# Altium footprint library LimeMicroAltiumLib.PcbLib: 876 footprints (part 18 of 57)
Each footprint in its own frame and in the unit in brackets; x right, y up, seen from the top. Pads: shape width x height; smd on the part's side, far side on the other; paste and mask are expansions set on the pad; w line width, h text height; cw(c..) or ccw(c..) is an arc to the next point about the centre after c.
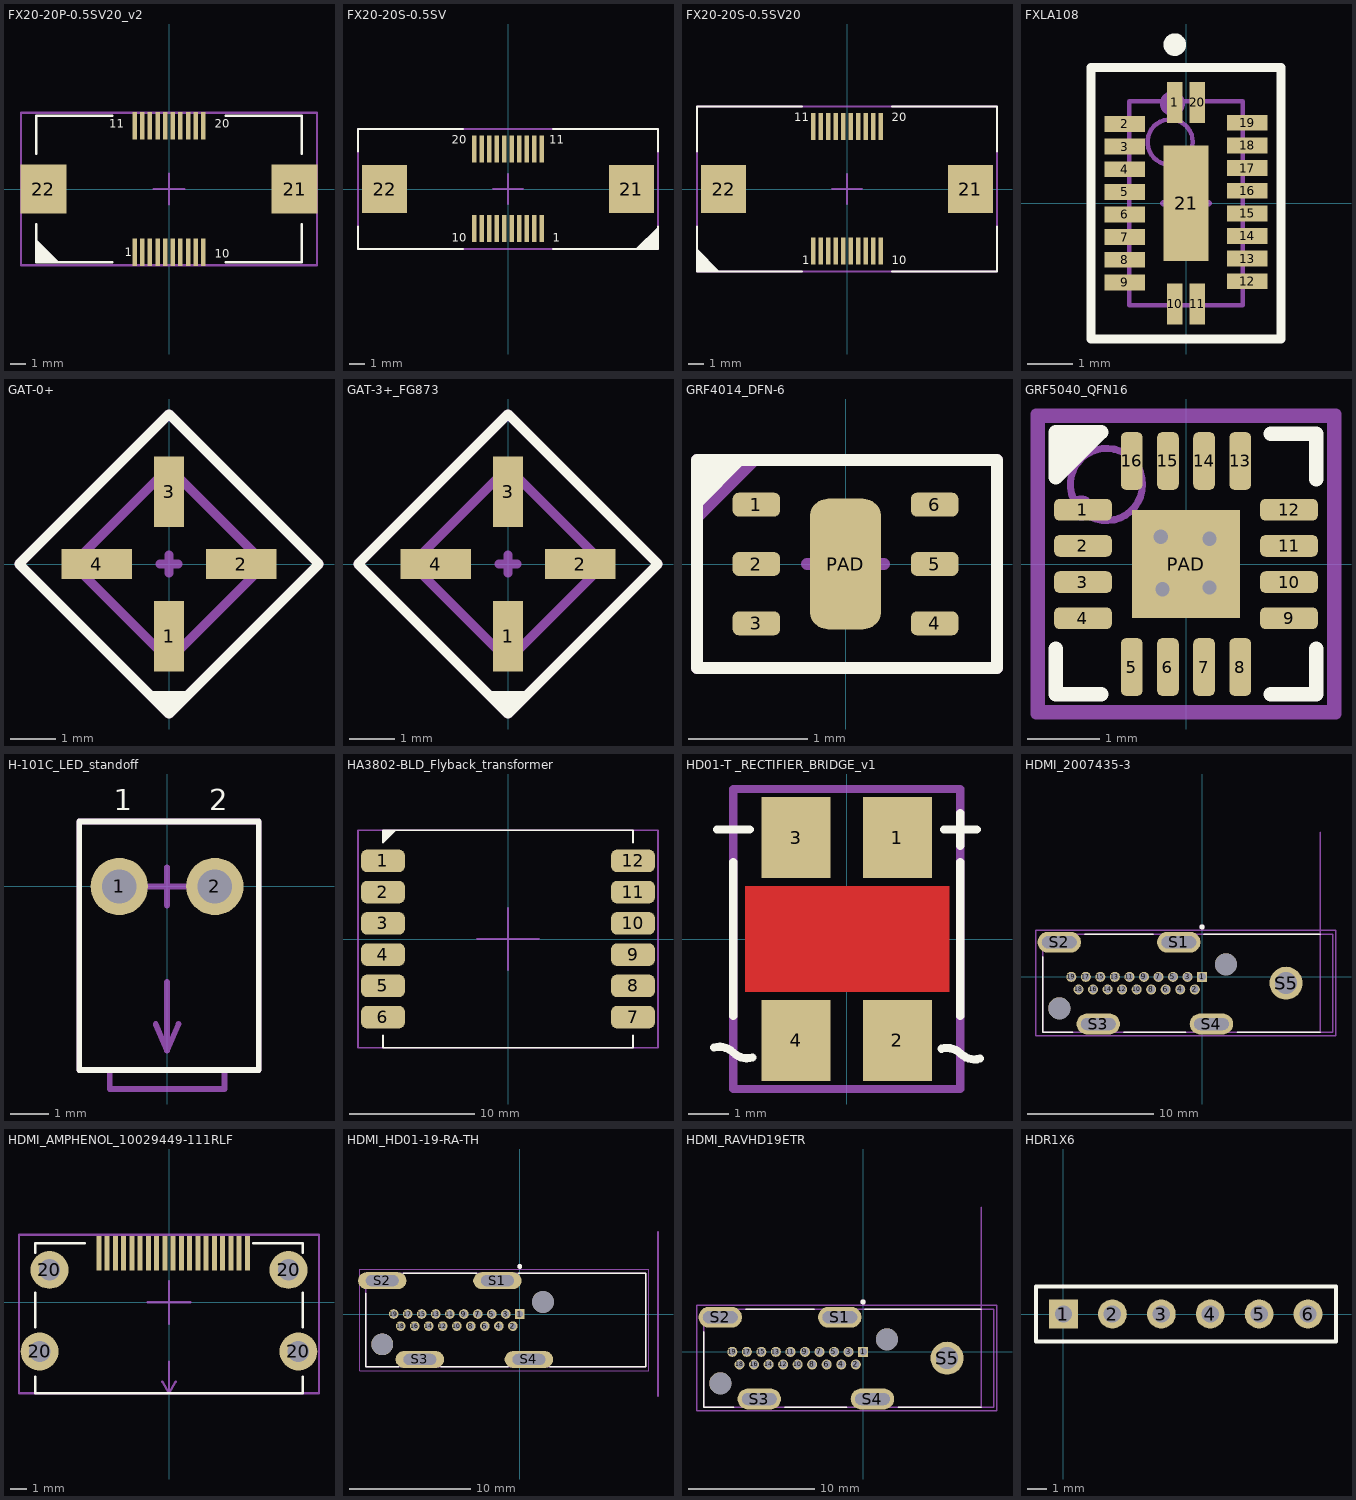
[diagram p17: the footprints below, top view; thin cyan lines are the x and y axes]

## FX20-20P-0.5SV20_v2 [mm]
pads (22):
  rect 0.3x1.8 smd mask+0.05: 1(-2.25,-4.15) 2(-1.75,-4.15) 3(-1.25,-4.15) 4(-0.75,-4.15) 5(-0.25,-4.15) 6(0.25,-4.15) 7(0.75,-4.15) 8(1.25,-4.15) 9(1.75,-4.15) 10(2.25,-4.15) 11(-2.25,4.15) 12(-1.75,4.15) 13(-1.25,4.15) 14(-0.75,4.15) 15(-0.25,4.15) 16(0.25,4.15) 17(0.75,4.15) 18(1.25,4.15) 19(1.75,4.15) 20(2.25,4.15)
  rect 3x3.2 smd mask+0.05: 21(8.23,0) 22(-8.23,0)
Top Overlay:
  region: -8.7,-3.3 -7.2,-4.8 -8.7,-4.8
  lines w0.15: -8.7,-2.3 -8.7,-4.8 -3.7,-4.8 ; -8.7,2.3 -8.7,4.8 -3.7,4.8 ; 3.7,-4.8 8.7,-4.8 8.7,-2.3 ; 3.7,4.8 8.7,4.8 8.7,2.3
  text "20" at 3,4 h0.55
  text "11" at -3.9,4 h0.55
  text "1" at -2.9,-4.4 h0.55
  text "10" at 3,-4.5 h0.55
Mechanical 15:
  lines w0.15: -1,0 1,0 ; 0,-1 0,1 ; -9.7,-5 -9.7,5 9.7,5 9.7,-5 -9.7,-5
  text ".Designator" at 0,0 h0.55
  text "1" at -2.5,-4.5 h0.55
  text "10" at 2.5,-4.5 h0.55
  text "11" at -3,4 h0.55
  text "20" at 2.5,4 h0.55
3D body "FX20-20P-0.5SV20.stp": height 18.2, standoff 0, extent -8.7,-4.75 8.7,4.75

## FX20-20S-0.5SV [mm]
pads (22):
  rect 0.3x1.8 smd mask+0.05: 1(2.25,-2.65) 2(1.75,-2.65) 3(1.25,-2.65) 4(0.75,-2.65) 5(0.25,-2.65) 6(-0.25,-2.65) 7(-0.75,-2.65) 8(-1.25,-2.65) 9(-1.75,-2.65) 10(-2.25,-2.65) 11(2.25,2.65) 12(1.75,2.65) 13(1.25,2.65) 14(0.75,2.65) 15(0.25,2.65) 16(-0.25,2.65) 17(-0.75,2.65) 18(-1.25,2.65) 19(-1.75,2.65) 20(-2.25,2.65)
  rect 3x3.2 smd mask+0.05: 21(8.23,0) 22(-8.23,0)
Top Overlay:
  region: 8.5,-4 10,-2.5 10,-4
  lines w0.15: -10,-2.5 -10,-4 -3,-4 ; -10,2.5 -10,4 -3,4 ; 3,-4 10,-4 10,-2.5 ; 3,4 10,4 10,2.5
  text "20" at -3.75,3 h0.55
  text "11" at 2.75,3 h0.55
  text "1" at 3,-3.5 h0.55
  text "10" at -3.75,-3.5 h0.55
Mechanical 15:
  lines w0.15: -1,0 1,0 ; 0,-1 0,1 ; -10,-4 -10,4 10,4 10,-4 -10,-4
  text ".Designator" at 0,0 h0.55
  text "1" at 2.5,-3 h0.55
  text "10" at -3,-3 h0.55
  text "11" at 2.5,2.5 h0.55
  text "20" at -3.5,2.5 h0.55
3D body "FX20-20S-0.5SV.stp": height 8.3, standoff 0, extent -8.7,-3.4 8.7,3.4

## FX20-20S-0.5SV20 [mm]
pads (22):
  rect 0.3x1.8 smd mask+0.05: 1(-2.25,-4.15) 2(-1.75,-4.15) 3(-1.25,-4.15) 4(-0.75,-4.15) 5(-0.25,-4.15) 6(0.25,-4.15) 7(0.75,-4.15) 8(1.25,-4.15) 9(1.75,-4.15) 10(2.25,-4.15) 11(-2.25,4.15) 12(-1.75,4.15) 13(-1.25,4.15) 14(-0.75,4.15) 15(-0.25,4.15) 16(0.25,4.15) 17(0.75,4.15) 18(1.25,4.15) 19(1.75,4.15) 20(2.25,4.15)
  rect 3x3.2 smd mask+0.05: 21(8.23,0) 22(-8.23,0)
Top Overlay:
  region: -10,-4 -8.5,-5.5 -10,-5.5
  lines w0.15: -10,-2.5 -10,-5.5 -3,-5.5 ; -10,2.5 -10,5.5 -3,5.5 ; 3,-5.5 10,-5.5 10,-2.5 ; 3,5.5 10,5.5 10,2.5
  text "10" at 3,-5 h0.55
  text "1" at -3,-5 h0.55
  text "11" at -3.5,4.5 h0.55
  text "20" at 3,4.5 h0.55
Mechanical 15:
  lines w0.15: -1,0 1,0 ; 0,-1 0,1 ; -10,-5.5 10,-5.5 10,5.5 -10,5.5 -10,-5.5
  text "20" at 2.5,4 h0.55
  text "11" at -3,4 h0.55
  text "10" at 2.5,-4.5 h0.55
  text "1" at -2.5,-4.5 h0.55
  text ".Designator" at 0,0 h0.55
3D body "FX20-20P-0.5SV20.stp": height 18.2, standoff 0, extent -8.7,-4.75 8.7,4.75

## FXLA108 [mm] "PQFN, 20-Leads, Body 2,50x4,50mm, Pitch 0,50mm, Thermal Pad 1,00x2,55mm, IPC Medium Density"
height 0.8
pads (21):
  rect 0.35x0.9 smd mask+0.05: 1(-0.25,2.225) 10(-0.25,-2.225) 11(0.25,-2.225) 20(0.25,2.225)
  rect 0.9x0.35 smd mask+0.05: 2(-1.35,1.75) 3(-1.35,1.25) 4(-1.35,0.75) 5(-1.35,0.25) 6(-1.35,-0.25) 7(-1.35,-0.75) 8(-1.35,-1.25) 9(-1.35,-1.75) 12(1.35,-1.725) 13(1.35,-1.225) 14(1.35,-0.725) 15(1.35,-0.225) 16(1.35,0.275) 17(1.35,0.775) 18(1.35,1.275) 19(1.35,1.775)
  rect 1x2.55 smd mask+0.05: 21(0,0)
Top Overlay:
  circle w0.25: c-0.25,3.5 r0.125
  lines w0.2: -2.1,-3 -2.1,3 2.1,3 2.1,-3 -2.1,-3
Top Solder:
  region: -0.475,-1.725 0.475,-1.725 0.475,-2.725 -0.475,-2.725
  region: -0.475,2.725 0.475,2.725 0.475,1.725 -0.475,1.725
  region: 0.85,2 0.85,-1.95 1.85,-1.95 1.85,2
  region: -1.85,1.975 -1.85,-1.975 -0.85,-1.975 -0.85,1.975
Mechanical 13:
  circle w0.1: c-0.35,1.35 r0.5
  lines w0.1: -1.25,-2.25 1.25,-2.25 1.25,2.25 -1.25,2.25 -1.25,-2.25
Mechanical 15:
  circle w0.35: c-0.3,2.2 r0.1
  lines w0.15: -0.5,0 0.5,0 ; 0,-0.5 0,0.5 ; -2.1,-3 2.1,-3 2.1,3 -2.1,3 -2.1,-3
  text ".Designator" at 0,0 h0.55
3D body: height 0.8, standoff 0, extent -1.25,-2.25 1.25,2.25

## GAT-0+ [mm]
pads (4):
  rect 0.65x1.55 smd: 1(0,-1.59) 3(0,1.59)
  rect 1.55x0.65 smd: 2(1.59,0) 4(-1.59,0)
Top Overlay:
  region: -0.5,-2.8 0.5,-2.8 0,-3.3
  lines w0.2: -3.3,0 0,-3.3 3.3,0 0,3.3 -3.3,0
Mechanical 13:
  lines w0.2: -2.12,0 0,-2.12 2.12,0 0,2.12 -2.12,0 ; -2.12,0 -2.12,0
Mechanical 15:
  circle w0.254: c0,-1.6 r0.056
  lines w0.2: -0.2,0 0,0 ; 0,-0.2 0,0 ; 0,0.2 0,0 ; 0.2,0 0,0 ; -3.3,0 0,-3.3 3.3,0 0,3.3 -3.3,0
  text ".Designator" at 0,0 h0.55
3D body "User Library-MINI-CIRCUITS_FG873.STEP": height 0.89, standoff -0.01, extent -2.121,-2.121 2.121,2.121

## GAT-3+_FG873 [mm]
pads (4):
  rect 0.65x1.55 smd: 1(0,-1.59) 3(0,1.59)
  rect 1.55x0.65 smd: 2(1.59,0) 4(-1.59,0)
Top Overlay:
  region: -0.5,-2.8 0.5,-2.8 0,-3.3
  lines w0.2: -3.3,0 0,3.3 3.3,0 0,-3.3 -3.3,0
Mechanical 13:
  lines w0.2: -2.12,0 0,2.12 2.12,0 0,-2.12 -2.12,0 ; -2.12,0 -2.12,0
Mechanical 15:
  circle w0.254: c0,-1.6 r0.056
  lines w0.2: -0.2,0 0,0 ; 0,-0.2 0,0 ; 0,0.2 0,0 ; 0.2,0 0,0 ; -3.3,0 0,3.3 3.3,0 0,-3.3 -3.3,0
  text ".Designator" at 0,0 h0.55
3D body "User Library-MINI-CIRCUITS_FG873.STEP": height 0.89, standoff -0.01, extent -2.122,-2.121 2.121,2.121

## GRF4014_DFN-6 [mm]
pads (7):
  rrect50% 0.4x0.2 smd mask+0.05: 1(-0.75,0.5) 2(-0.75,0) 3(-0.75,-0.5) 4(0.75,-0.5) 5(0.75,0) 6(0.75,0.5)
  rrect50% 0.6x1.1 smd mask+0.05: PAD(0,0)
Top Overlay:
  region: -1.25,0.45 -0.825,0.875 -1.25,0.875
  lines w0.1: 1.275,0.85 1.275,-0.875 -1.25,-0.875 -1.25,0.875 1.275,0.875
Mechanical 15:
  region: -1.25,0.325 -0.7,0.875 -1.25,0.875
  lines w0.1: -0.325,0 0,0 ; 0,-0.325 0,0 ; 0,0.325 0,0 ; 0.325,0 0,0 ; -1.25,-0.875 -1.25,0.875 1.275,0.875 1.275,-0.875 -1.25,-0.875
  text ".Designator" at 0,0.012 h0.55
3D body: height 0.45, standoff 0, extent -0.75,-0.75 0.75,0.75
3D body: height 0.46, standoff 0, extent -0.65,0.45 -0.451,0.65

## GRF5040_QFN16 [mm]
pads (17):
  rrect50% 0.8x0.3 smd mask+0.05: 1(-1.425,0.75) 2(-1.425,0.25) 3(-1.425,-0.25) 4(-1.425,-0.75) 9(1.425,-0.75) 10(1.425,-0.25) 11(1.425,0.25) 12(1.425,0.75)
  rrect50% 0.3x0.8 smd mask+0.05: 5(-0.75,-1.425) 6(-0.25,-1.425) 7(0.25,-1.425) 8(0.75,-1.425) 13(0.75,1.425) 14(0.25,1.425) 15(-0.25,1.425) 16(-0.75,1.425)
  rect 1.5x1.5 smd mask+0.05: PAD(0,0)
via -0.35,0.375 diameter 0.4 hole 0.2
via 0.325,0.35 diameter 0.4 hole 0.2
via 0.325,-0.325 diameter 0.4 hole 0.2
via -0.325,-0.35 diameter 0.4 hole 0.2
Top Overlay:
  region: -1.8,1.825 -1.8,1.2 -1.175,1.825
  lines w0.2: -1.8,-1.175 -1.8,-1.8 -1.175,-1.8 ; 1.175,-1.8 1.8,-1.8 1.8,-1.175 ; 1.175,1.8 1.8,1.8 1.8,1.175 ; -1.8,1.2 -1.175,1.825 -1.8,1.825 -1.8,1.2
Mechanical 13:
  circle w0.1: c-1.1,1.1 r0.5
  lines w0.1: -2,-2 2,-2 2,2 -2,2 -2,-2
Mechanical 15:
  circle w0.35: c-1.45,0.775 r0
  lines w0.15: -0.5,0 0.5,0 ; 0,-0.5 0,0.5 ; -2.075,-2.075 2.075,-2.075 2.075,2.075 -2.075,2.075 -2.075,-2.075
  text ".Designator" at 0,0 h0.55
3D body "User Library-qfn16-3x3.step": height 0.92, standoff 0, extent -1.5,-1.5 1.5,1.5

## H-101C_LED_standoff [mm]
pads (2):
  round 1.5 hole 0.9 mask+0.05: 1(-1.25,0) 2(1.25,0)
Top Overlay:
  lines w0.15: -2.3,-4.8 2.4,-4.8 2.4,1.7 -2.3,1.7 -2.3,-4.8
  text "1" at -1.4,2 h0.55
  text "2" at 1.1,2 h0.55
Mechanical 15:
  lines w0.15: -1.5,-4.8 -1.5,-5.3 1.5,-5.3 1.5,-4.8 ; -0.5,0 0,0 ; -0.3,-3.6 0,-4.3 ; 0,-2.5 0,-4.3 ; 0,-0.5 0,0 ; 0,0.5 0,0 ; 0.3,-3.6 0,-4.3 ; 0.5,0 0,0 ; -2.3,-4.8 2.4,-4.8 2.4,1.7 -2.3,1.7 -2.3,-4.8
  text ".Designator" at 0,0 h0.55
  text "1" at -1.3,-1.5 h0.39
  text "2" at 1.2,-1.5 h0.39
3D body "H-101C.stp": height 7.16, standoff 0.04, extent -2.118,-4.775 2.2,1.575
3D body: height 6.59, standoff 3.6, extent -1.494,-5.3 1.5,-3.3

## HA3802-BLD_Flyback_transformer [mm]
pads (12):
  rrect50% 3.5x1.8 smd: 1(-10,6.25) 2(-10,3.75) 3(-10,1.25) 4(-10,-1.25) 5(-10,-3.75) 6(-10,-6.25) 7(10,-6.25) 8(10,-3.75) 9(10,-1.25) 10(10,1.25) 11(10,3.75) 12(10,6.25)
Top Overlay:
  region: -10,7.7 -9,8.7 -10,8.7
  lines w0.15: -10,-7.7 -10,-8.7 10,-8.7 10,-7.7 ; -9,8.7 -10,7.7 -10,8.7 10,8.7 10,7.7
Mechanical 15:
  lines w0.15: -2.5,0 2.5,0 ; 0,-2.5 0,2.5 ; -12,-8.7 -12,8.7 12,8.7 12,-8.7 -12,-8.7
  text ".Designator" at 0,0 h0.55
  text "1" at -10.4,5.7 h0.55
  text "12" at 9.4,5.9 h0.55
  text "6" at -10.5,-6.7 h0.55
  text "7" at 9.7,-6.7 h0.55
3D body "Coilcraft-HA3801-BL.step": height 8.69, standoff -0.2, extent -11,-8.6 11,8.6

## HD01-T _RECTIFIER_BRIDGE_v1 [mm]
pads (4):
  rect 1.7x2 smd mask+0.05: 1(1.25,2.5) 2(1.25,-2.5) 3(-1.25,2.5) 4(-1.25,-2.5)
Top Layer:
  pour cut-out: -2.5,-1.3 -2.5,1.3 2.525,1.3 2.525,-1.3
Top Overlay:
  lines w0.2: -3.277,-2.678 cw(c-3.141,-3.141) -2.8,-2.8 ccw(c-2.459,-2.459) -2.323,-2.922 ; -3.2,2.7 -2.392,2.7 ; -2.8,-1.9 -2.8,0 -2.8,1.9 ; 2.335,-2.707 cw(c2.471,-3.171) 2.812,-2.829 ccw(c3.154,-2.488) 3.289,-2.951 ; 2.4,2.7 3.208,2.7 ; 2.8,-1.9 2.8,0 2.8,1.9 ; 2.8,2.3 2.8,3.108
Mechanical 15:
  lines w0.2: -1.958,-2.575 cw(c-1.616,-2.916) -1.616,-2.434 cw(c-1.616,-2.916) -1.275,-2.575 ccw(c-0.934,-2.234) -0.934,-2.716 ccw(c-0.934,-2.234) -0.592,-2.575 ; -1.8,2.5 -0.8,2.5 ; -1,0 1,0 ; 0,-1 0,1 ; 0.542,-2.575 cw(c0.884,-2.916) 0.884,-2.434 cw(c0.884,-2.916) 1.225,-2.575 ccw(c1.566,-2.234) 1.566,-2.716 ccw(c1.566,-2.234) 1.908,-2.575 ; 0.75,2.5 1.75,2.5 ; 1.25,2 1.25,3 ; -2.8,-3.7 -2.8,3.7 2.8,3.7 2.8,-3.7 -2.8,-3.7
  text ".Designator" at 0,0 h0.55
3D body "User Library-DFXXSv2.step": height 2.76, standoff 0.97, extent -2.136,-2.575 2.119,2.575

## HDMI_2007435-3 [mm]
pads (26):
  rect 0.8x0.8 / inner round 0.8 / far side rect 0.8x0.8 hole 0.6: 1(0,0)
  round 0.8 hole 0.6: 2(-0.577,-1) 3(-1.155,0) 4(-1.733,-1) 5(-2.31,0) 6(-2.887,-1) 7(-3.465,0) 8(-4.043,-1) 9(-4.62,0) 10(-5.198,-1) 11(-5.775,0) 12(-6.352,-1) 13(-6.93,0) 14(-7.508,-1) 15(-8.085,0) 16(-8.662,-1) 17(-9.24,0) 18(-9.818,-1) 19(-10.395,0)
  oval 3.46x1.66 hole 0.95 slot 2.75 at 0 deg: S1(-1.85,2.75) S2(-11.35,2.75) S3(-8.25,-3.75) S4(0.75,-3.75)
  round 2.625 hole 1.75: S5(6.68,-0.5)
  round 1.75 hole 1.75 unplated mask+0.254: ""(-11.35,-2.5) ""(1.9,1)
Top Overlay:
  circle w0.2: c0,3.975 r0.1
  lines w0.127: -12.66,1.606 -12.66,-4.4 -10.295,-4.4 ; -9.306,3.4 -3.895,3.4 ; -6.205,-4.4 -1.295,-4.4 ; 0.155,3.4 9.4,3.4 ; 2.795,-4.4 9.4,-4.4
Mechanical 13:
  circle w0.2: c0,3.975 r0.1
  lines w0.127: 9.4,11.5 9.4,-4.4 ; 9.4,-4.4 10.4,-4.4 10.4,3.4 -12.66,3.4 -12.66,-4.4 9.4,-4.4
  text "PCB EDGE" at 9.15,4.25 h1
Mechanical 15:
  lines w0.1: -13.2,-4.7 10.65,-4.7 10.65,3.7 -13.2,3.7 -13.2,-4.7
  text ".Designator" at -0.025,-0.525 h0.55
3D body "c-2007435-3-c-3d.stp": height 16.43, standoff -3.72, extent -12.7,-4.415 10.4,3.465

## HDMI_AMPHENOL_10029449-111RLF [mm]
pads (23):
  rect 0.3x2.1 smd mask+0.05: 1(4.75,2.975) 2(4.25,2.975) 3(3.75,2.975) 4(3.25,2.975) 5(2.75,2.975) 6(2.25,2.975) 7(1.75,2.975) 8(1.25,2.975) 9(0.75,2.975) 10(0.25,2.975) 11(-0.25,2.975) 12(-0.75,2.975) 13(-1.25,2.975) 14(-1.75,2.975) 15(-2.25,2.975) 16(-2.75,2.975) 17(-3.25,2.975) 18(-3.75,2.975) 19(-4.25,2.975)
  round 2.3 hole 1.3 mask+0.05: 20(-7.85,-2.975) 20(-7.25,1.975) 20(7.25,1.975) 20(7.85,-2.975)
Top Overlay:
  lines w0.15: -8.1,-4.5 -8.1,-5.5 8.1,-5.5 8.1,-4.5 ; -8.1,-1.5 -8.1,0.6 ; -8.1,3 -8.1,3.6 -5.1,3.6 ; 5.1,3.6 8.1,3.6 8.1,3 ; 8.1,-1.5 8.1,0.6
Mechanical 15:
  lines w0.15: -1.3,0 0,0 ; -0.4,-4.8 0,-5.5 ; 0,-3.6 0,-5.5 ; 0,-1.3 0,0 ; 0,1.3 0,0 ; 0.4,-4.8 0,-5.5 ; 1.3,0 0,0 ; -9.1,-5.5 9.1,-5.5 9.1,4.1 -9.1,4.1 -9.1,-5.5
  text "19" at -5.1,2.1 h0.55
  text "1" at 4.6,2.1 h0.55
  text ".Designator" at -0.1,-0.3 h0.55
  text "PCB edge" at -1.8,-3.7 h0.55
3D body "10029449-111RLF.stp": height 6.26, standoff -1.88, extent -8.1,-6.5 8.1,3.6

## HDMI_HD01-19-RA-TH [mm]
pads (25):
  rect 0.8x0.8 hole 0.55 mask+0.05: 1(0,0)
  round 0.8 hole 0.55 mask+0.05: 2(-0.578,-1) 3(-1.156,0) 4(-1.734,-1) 5(-2.312,0) 6(-2.89,-1) 7(-3.468,0) 8(-4.046,-1) 9(-4.624,0) 10(-5.202,-1) 11(-5.78,0) 12(-6.358,-1) 13(-6.936,0) 14(-7.514,-1) 15(-8.092,0) 16(-8.67,-1) 17(-9.248,0) 18(-9.826,-1) 19(-10.404,0)
  oval 4x1.4 hole 0.9 slot 2.7 at 0 deg: S1(-1.85,2.75) S2(-11.35,2.75) S3(-8.25,-3.75) S4(0.75,-3.75)
  round 1.8 hole 1.8 unplated: ""(-11.35,-2.5) ""(1.9,1)
Top Overlay:
  circle w0.2: c0,3.925 r0.1
  lines w0.127: -12.7,1.73 -12.7,-4.35 -9.97,-4.35 ; -9.63,3.35 -3.57,3.35 ; -6.53,-4.35 -0.97,-4.35 ; -0.13,3.35 10.4,3.35 10.4,-4.35 2.47,-4.35
Mechanical 13:
  circle w0.2: c0,3.925 r0.1
  lines w0.127: 11.4,-6.8 11.4,6.8 ; -12.7,-4.35 -12.7,3.35 10.4,3.35 10.4,-4.35 -12.7,-4.35
  text "PCB Edge" at 11.2,-6.8 h0.4
Mechanical 15:
  lines w0.1: -13.2,-4.7 -13.2,3.7 10.65,3.7 10.65,-4.7 -13.2,-4.7
  text ".Designator" at -0.025,-0.525 h0.55
3D body "72r3759_2007435-1.stp": height 16.43, standoff -3.72, extent -12.7,-4.45 10.4,3.43

## HDMI_RAVHD19ETR [mm]
pads (26):
  rect 0.8x0.8 / inner round 0.8 / far side rect 0.8x0.8 hole 0.6: 1(0,0)
  round 0.8 hole 0.6: 2(-0.577,-1) 3(-1.155,0) 4(-1.733,-1) 5(-2.31,0) 6(-2.887,-1) 7(-3.465,0) 8(-4.043,-1) 9(-4.62,0) 10(-5.198,-1) 11(-5.775,0) 12(-6.352,-1) 13(-6.93,0) 14(-7.508,-1) 15(-8.085,0) 16(-8.662,-1) 17(-9.24,0) 18(-9.818,-1) 19(-10.395,0)
  oval 3.46x1.66 hole 0.95 slot 2.75 at 0 deg: S1(-1.85,2.75) S2(-11.35,2.75) S3(-8.25,-3.75) S4(0.75,-3.75)
  round 2.625 hole 1.75: S5(6.68,-0.5)
  round 1.75 hole 1.75 unplated mask+0.254: ""(-11.35,-2.5) ""(1.9,1)
Top Overlay:
  circle w0.2: c0,3.975 r0.1
  lines w0.127: -12.66,1.606 -12.66,-4.4 -10.295,-4.4 ; -9.306,3.4 -3.895,3.4 ; -6.205,-4.4 -1.295,-4.4 ; 0.155,3.4 9.4,3.4 ; 2.795,-4.4 9.4,-4.4
Mechanical 13:
  circle w0.2: c0,3.975 r0.1
  lines w0.127: 9.4,11.5 9.4,-4.4 ; 9.4,-4.4 10.4,-4.4 10.4,3.4 -12.66,3.4 -12.66,-4.4 9.4,-4.4
  text "PCB EDGE" at 9.15,4.25 h1
Mechanical 15:
  lines w0.1: -13.2,-4.7 10.65,-4.7 10.65,3.7 -13.2,3.7 -13.2,-4.7
  text ".Designator" at -0.025,-0.525 h0.55
3D body "RAVHD19ETR.STEP": height 16.65, standoff -2.6, extent -12.649,-4.375 10.407,3.375

## HDR1X6 [mm] "Connector; Header; 6 Position"
pads (6):
  rect 1.5x1.5 hole 0.9: 1(0,0)
  round 1.5 hole 0.9: 2(2.54,0) 3(5.08,0) 4(7.62,0) 5(10.16,0) 6(12.7,0)
Top Overlay:
  lines w0.2: -1.425,-1.425 -1.425,1.425 14.15,1.425 14.15,-1.425 -1.425,-1.425
Mechanical 15:
  lines w0.15: -1.425,-1.425 14.15,-1.425 14.15,1.425 -1.425,1.425 -1.425,-1.425
  text ".Designator" at 5.08,0 h0.55
3D body "65775.stp": height 8.54, standoff -3, extent -1.27,-1.27 1.27,1.27
3D body "65775.stp": height 8.54, standoff -3, extent 1.27,-1.27 3.81,1.27
3D body "65775.stp": height 8.54, standoff -3, extent 3.81,-1.27 6.35,1.27
3D body "65775.stp": height 8.54, standoff -3, extent 6.35,-1.27 8.89,1.27
3D body "65775.stp": height 8.54, standoff -3, extent 8.89,-1.27 11.43,1.27
3D body "65775.stp": height 8.54, standoff -3, extent 11.43,-1.27 13.97,1.27